# Altium footprint library Resistencias.PcbLib: 28 footprints (part 1 of 2)
Each footprint in its own frame and in the unit in brackets; x right, y up, seen from the top. Pads: shape width x height; smd on the part's side, far side on the other; paste and mask are expansions set on the pad; w line width, h text height; cw(c..) or ccw(c..) is an arc to the next point about the centre after c.
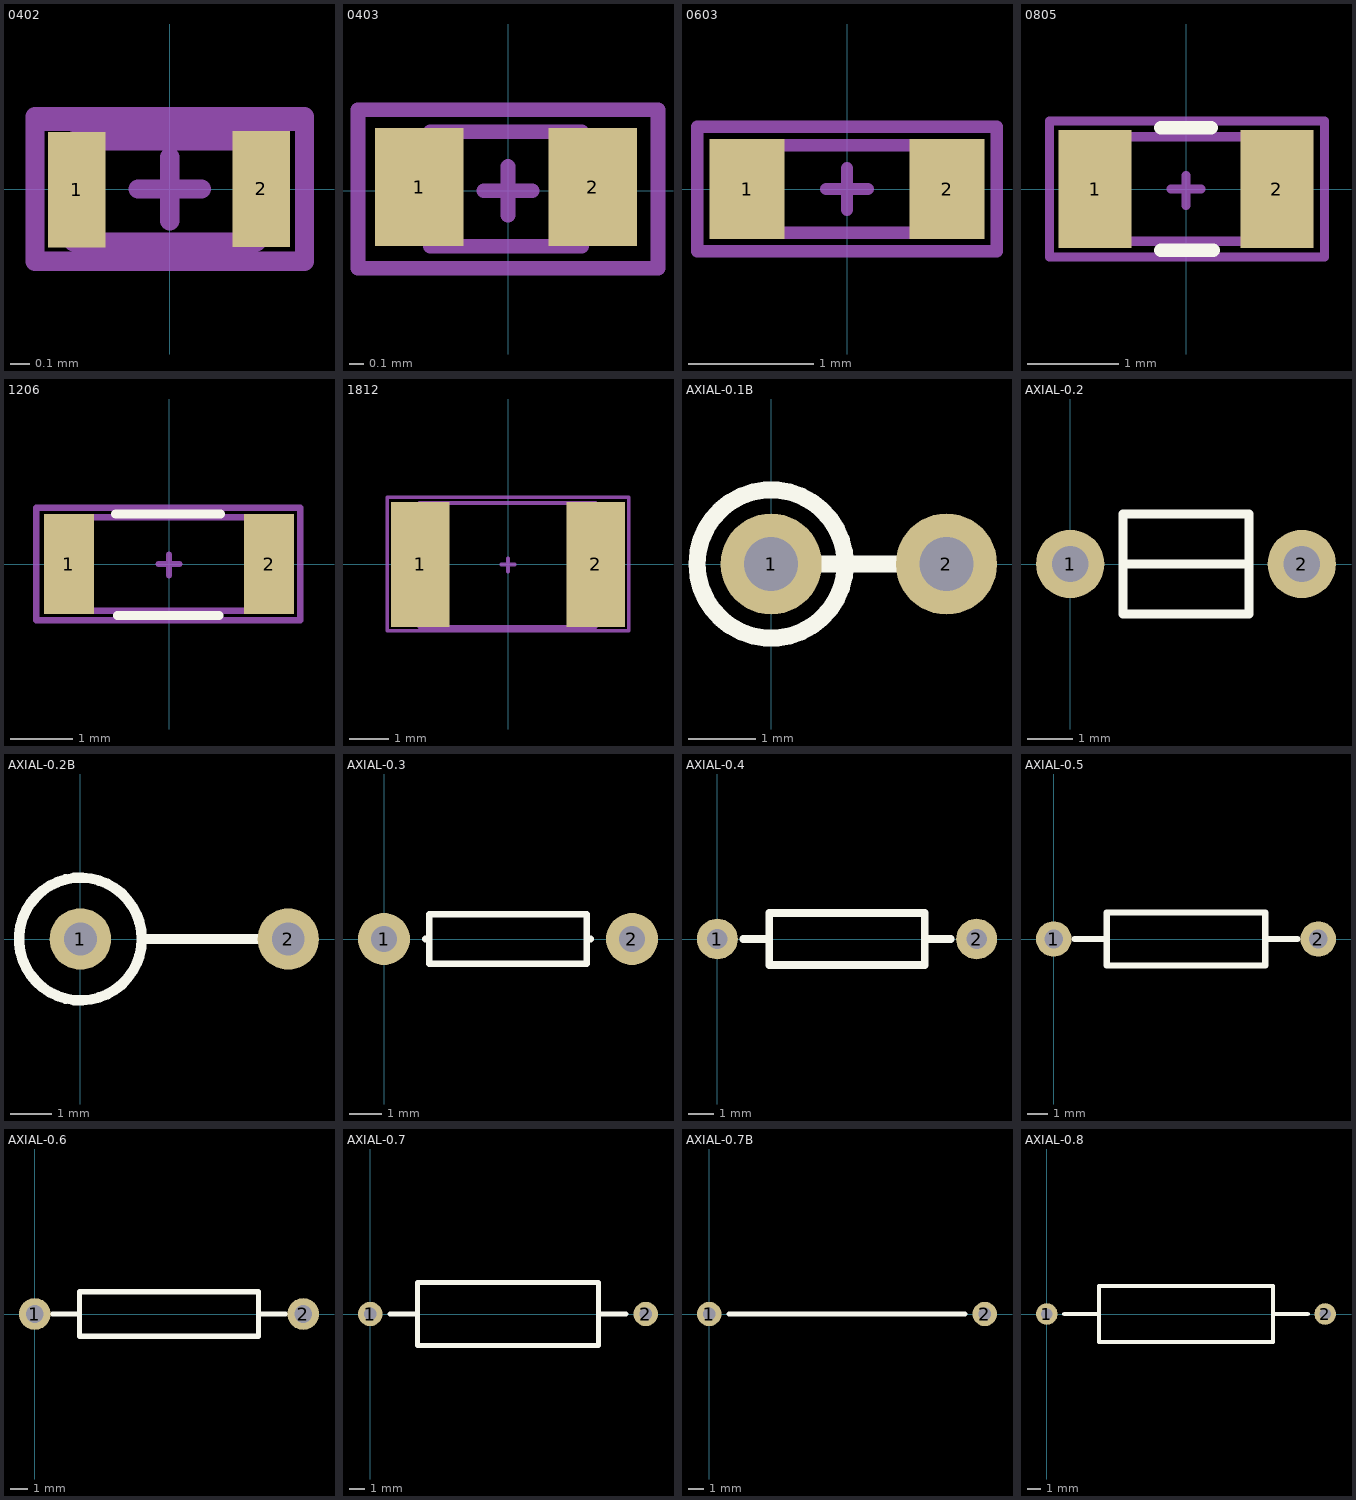
[diagram p0: the footprints below, top view; thin cyan lines are the x and y axes]

## 0402 [mm] "Chip Resistor, Empaque 0402"
height 0.3
pads (2):
  rect 0.3x0.6 smd: 1(-0.483,-0.004) 2(0.475,0)
Mechanical 13:
  lines w0.1: -0.5,-0.275 0.45,-0.275 0.45,0.25 -0.5,0.25 -0.5,-0.275
Mechanical 15:
  lines w0.1: -0.7,0.35 0.7,0.35 ; -0.165,0 0.165,0 ; 0,-0.165 0,0.165 ; -0.7,-0.375 0.7,-0.375 0.7,0.375 -0.7,0.375 -0.7,-0.375
3D body "0402 SMD Resistor.STEP": height 0.2, standoff 0, extent -0.508,-0.304 0.492,0.296

## 0403 [mm] "Chip Resistor, Empaque 0403"
height 0.3
pads (2):
  rect 0.6x0.8 smd: 1(-0.6,0.025) 2(0.575,0.025)
Mechanical 13:
  lines w0.1: -0.525,-0.375 0.5,-0.375 0.5,0.4 -0.525,0.4 -0.525,-0.375
Mechanical 15:
  lines w0.1: -0.165,0 0.165,0 ; 0,-0.165 0,0.165 ; -1.016,-0.525 1.016,-0.525 1.016,0.55 -1.016,0.55 -1.016,-0.525
3D body "0403.STEP": height 0.73, standoff -0.13, extent -0.525,-0.407 0.491,0.457
3D body "0403.STEP": height 0.85, standoff -0.01, extent -0.525,-0.425 0.491,0.439

## 0603 [mm] "Chip Resistor, Empaque 0603"
height 0.3
pads (2):
  rect 0.6x0.8 smd: 1(-0.8,0) 2(0.8,0)
Mechanical 13:
  lines w0.1: -0.8,-0.35 -0.8,0.35 0.8,0.35 0.8,-0.35 -0.8,-0.35
Mechanical 15:
  lines w0.1: -0.165,0 0.165,0 ; 0,-0.165 0,0.165 ; -1.2,-0.5 -1.2,0.5 1.2,0.5 1.2,-0.5 -1.2,-0.5
3D body "0603 SMD Resistor.STEP": height 0.3, standoff 0, extent -0.8,-0.4 0.8,0.4

## 0805 [mm] "Chip Resistor, Empaque 0805"
height 0.3
pads (2):
  rect 0.8x1.3 smd: 1(-1,0) 2(1,0)
Top Overlay:
  lines w0.15: -0.275,-0.675 0.3,-0.675 ; -0.275,0.675 0.275,0.675
Mechanical 13:
  lines w0.1: -1,-0.575 -1,0.575 1,0.575 1,-0.575 -1,-0.575
Mechanical 15:
  lines w0.1: -0.165,0 0.165,0 ; 0,-0.18 0,0.15 ; -1.5,-0.75 -1.5,0.75 1.525,0.75 1.525,-0.75 -1.5,-0.75
3D body "0805 SMD Resistor.STEP": height 0.78, standoff 0, extent -1,-0.625 1,0.625

## 1206 [mm] "Chip Resistor, Empaque 1206"
height 0.3
pads (2):
  rect 0.8x1.6 smd: 1(-1.6,0) 2(1.6,0)
Top Overlay:
  lines w0.15: -0.85,0.8 0.825,0.8 ; -0.825,-0.825 0.8,-0.825
Mechanical 13:
  lines w0.1: -1.6,-0.75 1.6,-0.75 1.6,0.75 -1.6,0.75 -1.6,-0.75
Mechanical 15:
  lines w0.1: -0.165,0 0.165,0 ; 0,-0.18 0,0.15 ; -2.125,-0.9 2.1,-0.9 2.1,0.9 -2.125,0.9 -2.125,-0.9
3D body "1206 SMD Resistor.STEP": height 1, standoff 0, extent -1.6,-0.8 1.6,0.8

## 1812 [mm] "Chip Resistor, Empaque 1812"
height 0.3
pads (2):
  rect 1.5x3.2 smd: 1(-2.25,0) 2(2.25,0)
Mechanical 13:
  lines w0.1: -2.275,-1.6 2.25,-1.6 2.25,1.575 -2.275,1.575 -2.275,-1.6
Mechanical 15:
  lines w0.1: -0.165,0 0.165,0 ; 0,-0.18 0,0.15 ; 3.075,1.725 -3.1,1.725 -3.1,-1.7 3.1,-1.7 3.1,1.725
3D body "1812 SMD Resistor.STEP": height 1.6, standoff 0, extent -2.25,-1.6 2.25,1.6

## AXIAL-0.1B [mm]
pads (2):
  round 1.5 hole 0.8: 1(0,0) 2(2.6,0)
Top Overlay:
  circle w0.254: c0,0 r1.1
  lines w0.254: 0,0 2.6,0

## AXIAL-0.2 [mm]
pads (2):
  round 1.5 hole 0.8: 1(0,0) 2(5.08,0)
Top Overlay:
  lines w0.2: 1.155,0 3.58,0 ; 1.5,0 3.925,0 ; 3.925,0 3.925,1.1 1.155,1.1 1.155,-1.1 3.925,-1.1 3.925,0

## AXIAL-0.2B [mm]
pads (2):
  round 1.5 hole 0.8: 1(0,0) 2(5.08,0)
Top Overlay:
  circle w0.254: c0,0 r1.5
  lines w0.254: 1.5,0 4.3,0

## AXIAL-0.3 [mm]
pads (2):
  round 1.6 hole 0.8: 1(0,0) 2(7.62,0)
Top Overlay:
  lines w0.2: 1.27,0 1.397,0 ; 6.35,0 6.223,0 ; 6.223,0 6.223,-0.762 1.397,-0.762 1.397,0.762 6.223,0.762 6.223,0
3D body "Resistor Axial-0.25W-7.62mm.STEP": height 2.5, standoff -3.7, extent -0.31,-1.2 7.91,1.208

## AXIAL-0.4 [mm]
pads (2):
  round 1.6 hole 0.8: 1(0,0) 2(10.16,0)
Top Overlay:
  lines w0.305: 1.016,0 2.032,0 ; 8.128,0 9.144,0 ; 2.032,-1.016 2.032,1.016 8.128,1.016 8.128,-1.016 2.032,-1.016

## AXIAL-0.5 [mm]
pads (2):
  round 1.7 hole 0.9: 1(0,0) 2(12.7,0)
Top Overlay:
  lines w0.305: 1.016,0 2.54,0 ; 10.16,0 11.684,0 ; 2.54,-1.27 2.54,1.27 10.16,1.27 10.16,-1.27 2.54,-1.27

## AXIAL-0.6 [mm]
pads (2):
  round 1.8 hole 1: 1(0,0) 2(15.24,0)
Top Overlay:
  lines w0.305: 1.016,0 2.54,0 ; 12.7,0 14.224,0 ; 2.54,-1.27 2.54,1.27 12.7,1.27 12.7,-1.27 2.54,-1.27

## AXIAL-0.7 [mil]
pads (2):
  round 62 hole 32: 1(0,0) 2(700,0)
Top Overlay:
  lines w12: 50,0 120,0 ; 580,0 650,0 ; 120,-80 580,-80 580,80 120,80 120,-80

## AXIAL-0.7B [mil]
pads (2):
  round 62 hole 32: 1(0,0) 2(700,0)
Top Overlay:
  lines w12: 50,0 120,0 ; 114.17,0 650,0

## AXIAL-0.8 [mil]
pads (2):
  round 62 hole 32: 1(0,0) 2(800,0)
Top Overlay:
  lines w12: 50,0 150,0 ; 650,0 750,0 ; 150,-80 650,-80 650,80 150,80 150,-80